# Altium integrated library OSTB0603C1C.IntLib: 1 symbol
Pins are listed as number, name and electrical type; pins without a type are passive.

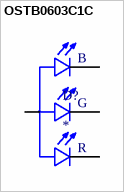
[diagram p0: symbol OSTB0603C1C]

## OSTB0603C1C
designator D?
LED; SMD; 0603; RGB; 1.6x1.5mm; 120Â°; Variant: tricolou; MF: OptoSupply; MP: OSTB0603C1C; SnapEDA_Link: https://www.snapeda.com/parts/OSTB0603C1C/OptoSupply/view-part/?ref=snap; Package: 0603 OptoSupply; Value: *; Check_prices: https://www.snapeda.com/parts/OSTB0603C1C/OptoSupply/view-part/?ref=eda
footprint LED_OSTB0603C1C
pins: 1, 2, 3, 4
text: B; G; R